# Altium schematic symbol library WR-TBL_Pluggable Connector.SchLib: 879 symbols (part 11 of 15)
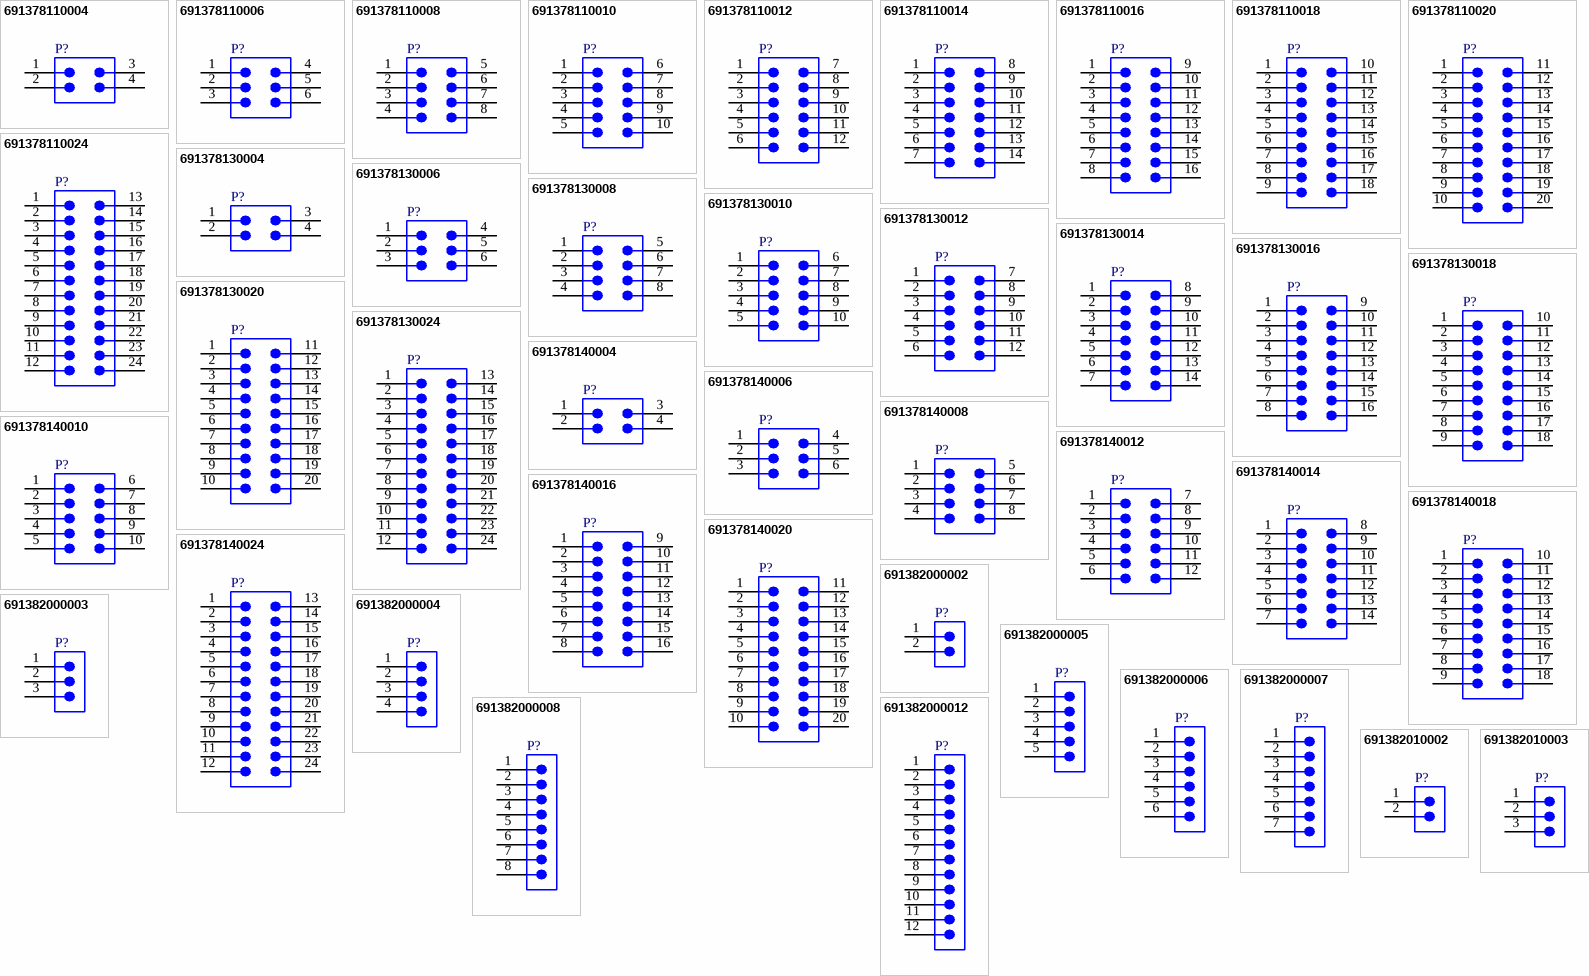
[diagram p31: symbols 691378110004 to 691382010003]

## 691382000006
designator P?  (value not drawn)
WR-TBL Series 382 Vertical PCB Header, THT, pitch 2.5mm, 06p; Manufacturer: Wurth Elektronik; Modularity: No; Rated Current: 12A; Working Voltage: 300V (AC); Manufacturer Part Number: 691382000006; Product Series: WR-TBL; ComponentLink1Description: Website Link; ComponentLink1URL: https://www.we-online.com; ComponentLink2Description: Datasheet Link; ComponentLink2URL: https://www.we-online.com/components/products/datasheet/691382000006; Mount: Through Hole; Operating Temperature Min: -40degC; Operating Temperature Max: 105degC; Packaging: Box; Application: Pluggable; Number of Pins: 6; Number of Rows: 1; Orientation: Vertical; Lead Pitch: 2.5mm
footprint 691382000006
pins: 1, 2, 3, 4, 5, 6

## 691382000007
designator P?  (value not drawn)
WR-TBL Series 382 Vertical PCB Header, THT, pitch 2.5mm, 07p; Manufacturer: Wurth Elektronik; Modularity: No; Rated Current: 12A; Working Voltage: 300V (AC); Manufacturer Part Number: 691382000007; Product Series: WR-TBL; ComponentLink1Description: Website Link; ComponentLink1URL: https://www.we-online.com; ComponentLink2Description: Datasheet Link; ComponentLink2URL: https://www.we-online.com/components/products/datasheet/691382000007; Mount: Through Hole; Operating Temperature Min: -40degC; Operating Temperature Max: 105degC; Packaging: Box; Application: Pluggable; Number of Pins: 7; Number of Rows: 1; Orientation: Vertical; Lead Pitch: 2.5mm
footprint 691382000007
pins: 1, 2, 3, 4, 5, 6, 7

## 691382000008
designator P?  (value not drawn)
WR-TBL Series 382 Vertical PCB Header, THT, pitch 2.5mm, 08p; Manufacturer: Wurth Elektronik; Modularity: No; Rated Current: 12A; Working Voltage: 300V (AC); Manufacturer Part Number: 691382000008; Product Series: WR-TBL; ComponentLink1Description: Website Link; ComponentLink1URL: https://www.we-online.com; ComponentLink2Description: Datasheet Link; ComponentLink2URL: https://www.we-online.com/components/products/datasheet/691382000008; Mount: Through Hole; Operating Temperature Min: -40degC; Operating Temperature Max: 105degC; Packaging: Box; Application: Pluggable; Number of Pins: 8; Number of Rows: 1; Orientation: Vertical; Lead Pitch: 2.5mm
footprint 691382000008
pins: 1, 2, 3, 4, 5, 6, 7, 8

## 691382000012
designator P?  (value not drawn)
WR-TBL Series 382 Vertical PCB Header, THT, pitch 2.5mm, 12p; Manufacturer: Wurth Elektronik; Modularity: No; Rated Current: 12A; Working Voltage: 300V (AC); Manufacturer Part Number: 691382000012; Product Series: WR-TBL; ComponentLink1Description: Website Link; ComponentLink1URL: https://www.we-online.com; ComponentLink2Description: Datasheet Link; ComponentLink2URL: https://www.we-online.com/components/products/datasheet/691382000012; Mount: Through Hole; Operating Temperature Min: -40degC; Operating Temperature Max: 105degC; Packaging: Box; Application: Pluggable; Number of Pins: 12; Number of Rows: 1; Orientation: Vertical; Lead Pitch: 2.5mm
footprint 691382000012
pins: 1, 2, 3, 4, 5, 6, 7, 8, 9, 10, 11, 12

## 691382010002
designator P?  (value not drawn)
WR-TBL Series 382 Horizontal PCB Header, THT, pitch 2.5mm, 02p; Manufacturer: Wurth Elektronik; Modularity: No; Rated Current: 12A; Working Voltage: 300V (AC); Manufacturer Part Number: 691382010002; Product Series: WR-TBL; ComponentLink1Description: Website Link; ComponentLink1URL: https://www.we-online.com; ComponentLink2Description: Datasheet Link; ComponentLink2URL: https://www.we-online.com/components/products/datasheet/691382010002; Mount: Through Hole; Operating Temperature Min: -40degC; Operating Temperature Max: 105degC; Packaging: Box; Application: Pluggable; Number of Pins: 2; Number of Rows: 1; Orientation: Horizontal; Lead Pitch: 2.5mm
footprint 691382010002
pins: 1, 2

## 691382010003
designator P?  (value not drawn)
WR-TBL Series 382 Horizontal PCB Header, THT, pitch 2.5mm, 03p; Manufacturer: Wurth Elektronik; Modularity: No; Rated Current: 12A; Working Voltage: 300V (AC); Manufacturer Part Number: 691382010003; Product Series: WR-TBL; ComponentLink1Description: Website Link; ComponentLink1URL: https://www.we-online.com; ComponentLink2Description: Datasheet Link; ComponentLink2URL: https://www.we-online.com/components/products/datasheet/691382010003; Mount: Through Hole; Operating Temperature Min: -40degC; Operating Temperature Max: 105degC; Packaging: Box; Application: Pluggable; Number of Pins: 3; Number of Rows: 1; Orientation: Horizontal; Lead Pitch: 2.5mm
footprint 691382010003
pins: 1, 2, 3

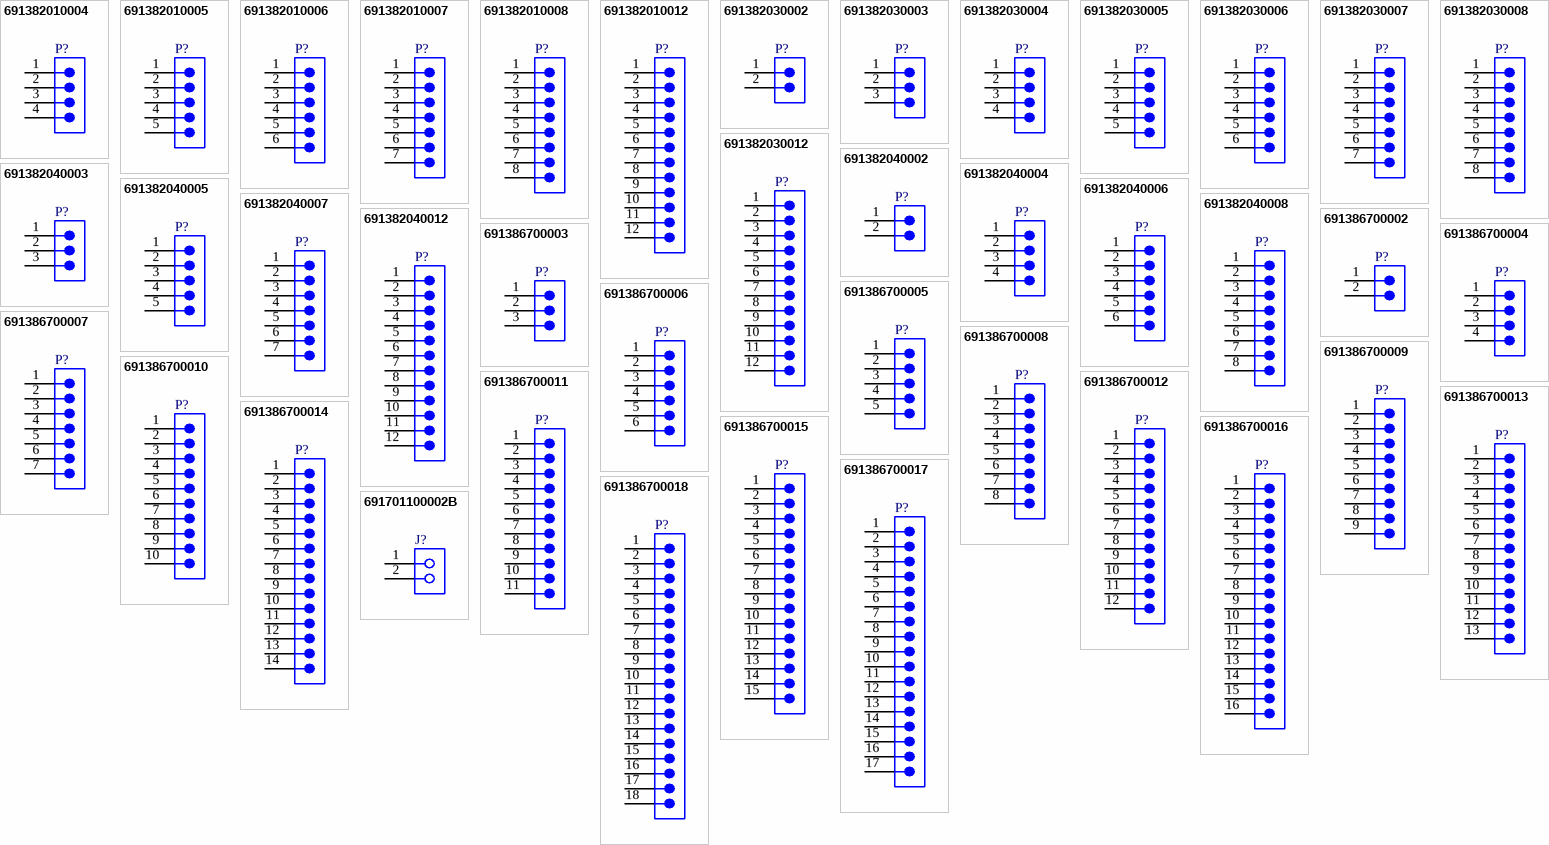
[diagram p16: symbols 691382010004 to 691701100002B]

## 691382010004
designator P?  (value not drawn)
WR-TBL Series 382 Horizontal PCB Header, THT, pitch 2.5mm, 04p; Manufacturer: Wurth Elektronik; Modularity: No; Rated Current: 12A; Working Voltage: 300V (AC); Manufacturer Part Number: 691382010004; Product Series: WR-TBL; ComponentLink1Description: Website Link; ComponentLink1URL: https://www.we-online.com; ComponentLink2Description: Datasheet Link; ComponentLink2URL: https://www.we-online.com/components/products/datasheet/691382010004; Mount: Through Hole; Operating Temperature Min: -40degC; Operating Temperature Max: 105degC; Packaging: Box; Application: Pluggable; Number of Pins: 4; Number of Rows: 1; Orientation: Horizontal; Lead Pitch: 2.5mm
footprint 691382010004
pins: 1, 2, 3, 4

## 691382010005
designator P?  (value not drawn)
WR-TBL Series 382 Horizontal PCB Header, THT, pitch 2.5mm, 05p; Manufacturer: Wurth Elektronik; Modularity: No; Rated Current: 12A; Working Voltage: 300V (AC); Manufacturer Part Number: 691382010005; Product Series: WR-TBL; ComponentLink1Description: Website Link; ComponentLink1URL: https://www.we-online.com; ComponentLink2Description: Datasheet Link; ComponentLink2URL: https://www.we-online.com/components/products/datasheet/691382010005; Mount: Through Hole; Operating Temperature Min: -40degC; Operating Temperature Max: 105degC; Packaging: Box; Application: Pluggable; Number of Pins: 5; Number of Rows: 1; Orientation: Horizontal; Lead Pitch: 2.5mm
footprint 691382010005
pins: 1, 2, 3, 4, 5

## 691382010006
designator P?  (value not drawn)
WR-TBL Series 382 Horizontal PCB Header, THT, pitch 2.5mm, 06p; Manufacturer: Wurth Elektronik; Modularity: No; Rated Current: 12A; Working Voltage: 300V (AC); Manufacturer Part Number: 691382010006; Product Series: WR-TBL; ComponentLink1Description: Website Link; ComponentLink1URL: https://www.we-online.com; ComponentLink2Description: Datasheet Link; ComponentLink2URL: https://www.we-online.com/components/products/datasheet/691382010006; Mount: Through Hole; Operating Temperature Min: -40degC; Operating Temperature Max: 105degC; Packaging: Box; Application: Pluggable; Number of Pins: 6; Number of Rows: 1; Orientation: Horizontal; Lead Pitch: 2.5mm
footprint 691382010006
pins: 1, 2, 3, 4, 5, 6

## 691382010007
designator P?  (value not drawn)
WR-TBL Series 382 Horizontal PCB Header, THT, pitch 2.5mm, 07p; Manufacturer: Wurth Elektronik; Modularity: No; Rated Current: 12A; Working Voltage: 300V (AC); Manufacturer Part Number: 691382010007; Product Series: WR-TBL; ComponentLink1Description: Website Link; ComponentLink1URL: https://www.we-online.com; ComponentLink2Description: Datasheet Link; ComponentLink2URL: https://www.we-online.com/components/products/datasheet/691382010007; Mount: Through Hole; Operating Temperature Min: -40degC; Operating Temperature Max: 105degC; Packaging: Box; Application: Pluggable; Number of Pins: 7; Number of Rows: 1; Orientation: Horizontal; Lead Pitch: 2.5mm
footprint 691382010007
pins: 1, 2, 3, 4, 5, 6, 7

## 691382010008
designator P?  (value not drawn)
WR-TBL Series 382 Horizontal PCB Header, THT, pitch 2.5mm, 08p; Manufacturer: Wurth Elektronik; Modularity: No; Rated Current: 12A; Working Voltage: 300V (AC); Manufacturer Part Number: 691382010008; Product Series: WR-TBL; ComponentLink1Description: Website Link; ComponentLink1URL: https://www.we-online.com; ComponentLink2Description: Datasheet Link; ComponentLink2URL: https://www.we-online.com/components/products/datasheet/691382010008; Mount: Through Hole; Operating Temperature Min: -40degC; Operating Temperature Max: 105degC; Packaging: Box; Application: Pluggable; Number of Pins: 8; Number of Rows: 1; Orientation: Horizontal; Lead Pitch: 2.5mm
footprint 691382010008
pins: 1, 2, 3, 4, 5, 6, 7, 8

## 691382010012
designator P?  (value not drawn)
WR-TBL Series 382 Horizontal PCB Header, THT, pitch 2.5mm, 12p; Manufacturer: Wurth Elektronik; Modularity: No; Rated Current: 12A; Working Voltage: 300V (AC); Manufacturer Part Number: 691382010012; Product Series: WR-TBL; ComponentLink1Description: Website Link; ComponentLink1URL: https://www.we-online.com; ComponentLink2Description: Datasheet Link; ComponentLink2URL: https://www.we-online.com/components/products/datasheet/691382010012; Mount: Through Hole; Operating Temperature Min: -40degC; Operating Temperature Max: 105degC; Packaging: Box; Application: Pluggable; Number of Pins: 12; Number of Rows: 1; Orientation: Horizontal; Lead Pitch: 2.5mm
footprint 691382010012
pins: 1, 2, 3, 4, 5, 6, 7, 8, 9, 10, 11, 12

## 691382030002
designator P?  (value not drawn)
WR-TBL Series 382 Vertical PCB Header with Flanges, THT, pitch 2.5mm, 02p; Manufacturer: Wurth Elektronik; Modularity: No; Rated Current: 12A; Working Voltage: 300V (AC); Manufacturer Part Number: 691382030002; Product Series: WR-TBL; ComponentLink1Description: Website Link; ComponentLink1URL: https://www.we-online.com; ComponentLink2Description: Datasheet Link; ComponentLink2URL: https://www.we-online.com/components/products/datasheet/691382030002; Mount: Through Hole; Operating Temperature Min: -40degC; Operating Temperature Max: 105degC; Packaging: Box; Application: Pluggable; Number of Pins: 2; Number of Rows: 1; Orientation: Vertical; Lead Pitch: 2.5mm
footprint 691382030002
pins: 1, 2

## 691382030003
designator P?  (value not drawn)
WR-TBL Series 382 Vertical PCB Header with Flanges, THT, pitch 2.5mm, 03p; Manufacturer: Wurth Elektronik; Modularity: No; Rated Current: 12A; Working Voltage: 300V (AC); Manufacturer Part Number: 691382030003; Product Series: WR-TBL; ComponentLink1Description: Website Link; ComponentLink1URL: https://www.we-online.com; ComponentLink2Description: Datasheet Link; ComponentLink2URL: https://www.we-online.com/components/products/datasheet/691382030003; Mount: Through Hole; Operating Temperature Min: -40degC; Operating Temperature Max: 105degC; Packaging: Box; Application: Pluggable; Number of Pins: 3; Number of Rows: 1; Orientation: Vertical; Lead Pitch: 2.5mm
footprint 691382030003
pins: 1, 2, 3

## 691382030004
designator P?  (value not drawn)
WR-TBL Series 382 Vertical PCB Header with Flanges, THT, pitch 2.5mm, 04p; Manufacturer: Wurth Elektronik; Modularity: No; Rated Current: 12A; Working Voltage: 300V (AC); Manufacturer Part Number: 691382030004; Product Series: WR-TBL; ComponentLink1Description: Website Link; ComponentLink1URL: https://www.we-online.com; ComponentLink2Description: Datasheet Link; ComponentLink2URL: https://www.we-online.com/components/products/datasheet/691382030004; Mount: Through Hole; Operating Temperature Min: -40degC; Operating Temperature Max: 105degC; Packaging: Box; Application: Pluggable; Number of Pins: 4; Number of Rows: 1; Orientation: Vertical; Lead Pitch: 2.5mm
footprint 691382030004
pins: 1, 2, 3, 4

## 691382030005
designator P?  (value not drawn)
WR-TBL Series 382 Vertical PCB Header with Flanges, THT, pitch 2.5mm, 05p; Manufacturer: Wurth Elektronik; Modularity: No; Rated Current: 12A; Working Voltage: 300V (AC); Manufacturer Part Number: 691382030005; Product Series: WR-TBL; ComponentLink1Description: Website Link; ComponentLink1URL: https://www.we-online.com; ComponentLink2Description: Datasheet Link; ComponentLink2URL: https://www.we-online.com/components/products/datasheet/691382030005; Mount: Through Hole; Operating Temperature Min: -40degC; Operating Temperature Max: 105degC; Packaging: Box; Application: Pluggable; Number of Pins: 5; Number of Rows: 1; Orientation: Vertical; Lead Pitch: 2.5mm
footprint 691382030005
pins: 1, 2, 3, 4, 5

## 691382030006
designator P?  (value not drawn)
WR-TBL Series 382 Vertical PCB Header with Flanges, THT, pitch 2.5mm, 06p; Manufacturer: Wurth Elektronik; Modularity: No; Rated Current: 12A; Working Voltage: 300V (AC); Manufacturer Part Number: 691382030006; Product Series: WR-TBL; ComponentLink1Description: Website Link; ComponentLink1URL: https://www.we-online.com; ComponentLink2Description: Datasheet Link; ComponentLink2URL: https://www.we-online.com/components/products/datasheet/691382030006; Mount: Through Hole; Operating Temperature Min: -40degC; Operating Temperature Max: 105degC; Packaging: Box; Application: Pluggable; Number of Pins: 6; Number of Rows: 1; Orientation: Vertical; Lead Pitch: 2.5mm
footprint 691382030006
pins: 1, 2, 3, 4, 5, 6

## 691382030007
designator P?  (value not drawn)
WR-TBL Series 382 Vertical PCB Header with Flanges, THT, pitch 2.5mm, 07p; Manufacturer: Wurth Elektronik; Modularity: No; Rated Current: 12A; Working Voltage: 300V (AC); Manufacturer Part Number: 691382030007; Product Series: WR-TBL; ComponentLink1Description: Website Link; ComponentLink1URL: https://www.we-online.com; ComponentLink2Description: Datasheet Link; ComponentLink2URL: https://www.we-online.com/components/products/datasheet/691382030007; Mount: Through Hole; Operating Temperature Min: -40degC; Operating Temperature Max: 105degC; Packaging: Box; Application: Pluggable; Number of Pins: 7; Number of Rows: 1; Orientation: Vertical; Lead Pitch: 2.5mm
footprint 691382030007
pins: 1, 2, 3, 4, 5, 6, 7

## 691382030008
designator P?  (value not drawn)
WR-TBL Series 382 Vertical PCB Header with Flanges, THT, pitch 2.5mm, 08p; Manufacturer: Wurth Elektronik; Modularity: No; Rated Current: 12A; Working Voltage: 300V (AC); Manufacturer Part Number: 691382030008; Product Series: WR-TBL; ComponentLink1Description: Website Link; ComponentLink1URL: https://www.we-online.com; ComponentLink2Description: Datasheet Link; ComponentLink2URL: https://www.we-online.com/components/products/datasheet/691382030008; Mount: Through Hole; Operating Temperature Min: -40degC; Operating Temperature Max: 105degC; Packaging: Box; Application: Pluggable; Number of Pins: 8; Number of Rows: 1; Orientation: Vertical; Lead Pitch: 2.5mm
footprint 691382030008
pins: 1, 2, 3, 4, 5, 6, 7, 8

## 691382030012
designator P?  (value not drawn)
WR-TBL Series 382 Vertical PCB Header with Flanges, THT, pitch 2.5mm, 12p; Manufacturer: Wurth Elektronik; Modularity: No; Rated Current: 12A; Working Voltage: 300V (AC); Manufacturer Part Number: 691382030012; Product Series: WR-TBL; ComponentLink1Description: Website Link; ComponentLink1URL: https://www.we-online.com; ComponentLink2Description: Datasheet Link; ComponentLink2URL: https://www.we-online.com/components/products/datasheet/691382030012; Mount: Through Hole; Operating Temperature Min: -40degC; Operating Temperature Max: 105degC; Packaging: Box; Application: Pluggable; Number of Pins: 12; Number of Rows: 1; Orientation: Vertical; Lead Pitch: 2.5mm
footprint 691382030012
pins: 1, 2, 3, 4, 5, 6, 7, 8, 9, 10, 11, 12

## 691382040002
designator P?  (value not drawn)
WR-TBL Series 382 Horizontal PCB Header with Flanges, THT, pitch 2.5mm, 02p; Manufacturer: Wurth Elektronik; Modularity: No; Rated Current: 12A; Working Voltage: 300V (AC); Manufacturer Part Number: 691382040002; Product Series: WR-TBL; ComponentLink1Description: Website Link; ComponentLink1URL: https://www.we-online.com; ComponentLink2Description: Datasheet Link; ComponentLink2URL: https://www.we-online.com/components/products/datasheet/691382040002; Mount: Through Hole; Operating Temperature Min: -40degC; Operating Temperature Max: 105degC; Packaging: Box; Application: Pluggable; Number of Pins: 2; Number of Rows: 1; Orientation: Horizontal; Lead Pitch: 2.5mm
footprint 691382040002
pins: 1, 2

## 691382040003
designator P?  (value not drawn)
WR-TBL Series 382 Horizontal PCB Header with Flanges, THT, pitch 2.5mm, 03p; Manufacturer: Wurth Elektronik; Modularity: No; Rated Current: 12A; Working Voltage: 300V (AC); Manufacturer Part Number: 691382040003; Product Series: WR-TBL; ComponentLink1Description: Website Link; ComponentLink1URL: https://www.we-online.com; ComponentLink2Description: Datasheet Link; ComponentLink2URL: https://www.we-online.com/components/products/datasheet/691382040003; Mount: Through Hole; Operating Temperature Min: -40degC; Operating Temperature Max: 105degC; Packaging: Box; Application: Pluggable; Number of Pins: 3; Number of Rows: 1; Orientation: Horizontal; Lead Pitch: 2.5mm
footprint 691382040003
pins: 1, 2, 3

## 691382040004
designator P?  (value not drawn)
WR-TBL Series 382 Horizontal PCB Header with Flanges, THT, pitch 2.5mm, 04p; Manufacturer: Wurth Elektronik; Modularity: No; Rated Current: 12A; Working Voltage: 300V (AC); Manufacturer Part Number: 691382040004; Product Series: WR-TBL; ComponentLink1Description: Website Link; ComponentLink1URL: https://www.we-online.com; ComponentLink2Description: Datasheet Link; ComponentLink2URL: https://www.we-online.com/components/products/datasheet/691382040004; Mount: Through Hole; Operating Temperature Min: -40degC; Operating Temperature Max: 105degC; Packaging: Box; Application: Pluggable; Number of Pins: 4; Number of Rows: 1; Orientation: Horizontal; Lead Pitch: 2.5mm
footprint 691382040004
pins: 1, 2, 3, 4

## 691382040005
designator P?  (value not drawn)
WR-TBL Series 382 Horizontal PCB Header with Flanges, THT, pitch 2.5mm, 05p; Manufacturer: Wurth Elektronik; Modularity: No; Rated Current: 12A; Working Voltage: 300V (AC); Manufacturer Part Number: 691382040005; Product Series: WR-TBL; ComponentLink1Description: Website Link; ComponentLink1URL: https://www.we-online.com; ComponentLink2Description: Datasheet Link; ComponentLink2URL: https://www.we-online.com/components/products/datasheet/691382040005; Mount: Through Hole; Operating Temperature Min: -40degC; Operating Temperature Max: 105degC; Packaging: Box; Application: Pluggable; Number of Pins: 5; Number of Rows: 1; Orientation: Horizontal; Lead Pitch: 2.5mm
footprint 691382040005
pins: 1, 2, 3, 4, 5

## 691382040006
designator P?  (value not drawn)
WR-TBL Series 382 Horizontal PCB Header with Flanges, THT, pitch 2.5mm, 06p; Manufacturer: Wurth Elektronik; Modularity: No; Rated Current: 12A; Working Voltage: 300V (AC); Manufacturer Part Number: 691382040006; Product Series: WR-TBL; ComponentLink1Description: Website Link; ComponentLink1URL: https://www.we-online.com; ComponentLink2Description: Datasheet Link; ComponentLink2URL: https://www.we-online.com/components/products/datasheet/691382040006; Mount: Through Hole; Operating Temperature Min: -40degC; Operating Temperature Max: 105degC; Packaging: Box; Application: Pluggable; Number of Pins: 6; Number of Rows: 1; Orientation: Horizontal; Lead Pitch: 2.5mm
footprint 691382040006
pins: 1, 2, 3, 4, 5, 6

## 691382040007
designator P?  (value not drawn)
WR-TBL Series 382 Horizontal PCB Header with Flanges, THT, pitch 2.5mm, 07p; Manufacturer: Wurth Elektronik; Modularity: No; Rated Current: 12A; Working Voltage: 300V (AC); Manufacturer Part Number: 691382040007; Product Series: WR-TBL; ComponentLink1Description: Website Link; ComponentLink1URL: https://www.we-online.com; ComponentLink2Description: Datasheet Link; ComponentLink2URL: https://www.we-online.com/components/products/datasheet/691382040007; Mount: Through Hole; Operating Temperature Min: -40degC; Operating Temperature Max: 105degC; Packaging: Box; Application: Pluggable; Number of Pins: 7; Number of Rows: 1; Orientation: Horizontal; Lead Pitch: 2.5mm
footprint 691382040007
pins: 1, 2, 3, 4, 5, 6, 7

## 691382040008
designator P?  (value not drawn)
WR-TBL Series 382 Horizontal PCB Header with Flanges, THT, pitch 2.5mm, 08p; Manufacturer: Wurth Elektronik; Modularity: No; Rated Current: 12A; Working Voltage: 300V (AC); Manufacturer Part Number: 691382040008; Product Series: WR-TBL; ComponentLink1Description: Website Link; ComponentLink1URL: https://www.we-online.com; ComponentLink2Description: Datasheet Link; ComponentLink2URL: https://www.we-online.com/components/products/datasheet/691382040008; Mount: Through Hole; Operating Temperature Min: -40degC; Operating Temperature Max: 105degC; Packaging: Box; Application: Pluggable; Number of Pins: 8; Number of Rows: 1; Orientation: Horizontal; Lead Pitch: 2.5mm
footprint 691382040008
pins: 1, 2, 3, 4, 5, 6, 7, 8

## 691382040012
designator P?  (value not drawn)
WR-TBL Series 382 Horizontal PCB Header with Flanges, THT, pitch 2.5mm, 12p; Manufacturer: Wurth Elektronik; Modularity: No; Rated Current: 12A; Working Voltage: 300V (AC); Manufacturer Part Number: 691382040012; Product Series: WR-TBL; ComponentLink1Description: Website Link; ComponentLink1URL: https://www.we-online.com; ComponentLink2Description: Datasheet Link; ComponentLink2URL: https://www.we-online.com/components/products/datasheet/691382040012; Mount: Through Hole; Operating Temperature Min: -40degC; Operating Temperature Max: 105degC; Packaging: Box; Application: Pluggable; Number of Pins: 12; Number of Rows: 1; Orientation: Horizontal; Lead Pitch: 2.5mm
footprint 691382040012
pins: 1, 2, 3, 4, 5, 6, 7, 8, 9, 10, 11, 12

## 691386700002
designator P?  (value not drawn)
WR-TBL Series 386 Horizontal/Vertical Divisible PCB Header, THT, pitch 5mm, 02p; Manufacturer: Wurth Elektronik; Modularity: No; Rated Current: 14A; Working Voltage: 300V (AC); Manufacturer Part Number: 691386700002; Product Series: WR-TBL; ComponentLink1Description: Website Link; ComponentLink1URL: https://www.we-online.com; ComponentLink2Description: Datasheet Link; ComponentLink2URL: https://www.we-online.com/components/products/datasheet/691386700002; Mount: Through Hole; Operating Temperature Min: -30degC; Operating Temperature Max: 120degC; Packaging: Box; Application: Pluggable; Number of Pins: 2; Number of Rows: 1; Orientation: Horizontal/Vertical; Lead Pitch: 5mm
footprint 691386700002
pins: 1, 2

## 691386700003
designator P?  (value not drawn)
WR-TBL Series 386 Horizontal/Vertical Divisible PCB Header, THT, pitch 5mm, 03p; Manufacturer: Wurth Elektronik; Modularity: No; Rated Current: 14A; Working Voltage: 300V (AC); Manufacturer Part Number: 691386700003; Product Series: WR-TBL; ComponentLink1Description: Website Link; ComponentLink1URL: https://www.we-online.com; ComponentLink2Description: Datasheet Link; ComponentLink2URL: https://www.we-online.com/components/products/datasheet/691386700003; Mount: Through Hole; Operating Temperature Min: -30degC; Operating Temperature Max: 120degC; Packaging: Box; Application: Pluggable; Number of Pins: 3; Number of Rows: 1; Orientation: Horizontal/Vertical; Lead Pitch: 5mm
footprint 691386700003
pins: 1, 2, 3

## 691386700004
designator P?  (value not drawn)
WR-TBL Series 386 Horizontal/Vertical Divisible PCB Header, THT, pitch 5mm, 04p; Manufacturer: Wurth Elektronik; Modularity: No; Rated Current: 14A; Working Voltage: 300V (AC); Manufacturer Part Number: 691386700004; Product Series: WR-TBL; ComponentLink1Description: Website Link; ComponentLink1URL: https://www.we-online.com; ComponentLink2Description: Datasheet Link; ComponentLink2URL: https://www.we-online.com/components/products/datasheet/691386700004; Mount: Through Hole; Operating Temperature Min: -30degC; Operating Temperature Max: 120degC; Packaging: Box; Application: Pluggable; Number of Pins: 4; Number of Rows: 1; Orientation: Horizontal/Vertical; Lead Pitch: 5mm
footprint 691386700004
pins: 1, 2, 3, 4

## 691386700005
designator P?  (value not drawn)
WR-TBL Series 386 Horizontal/Vertical Divisible PCB Header, THT, pitch 5mm, 05p; Manufacturer: Wurth Elektronik; Modularity: No; Rated Current: 14A; Working Voltage: 300V (AC); Manufacturer Part Number: 691386700005; Product Series: WR-TBL; ComponentLink1Description: Website Link; ComponentLink1URL: https://www.we-online.com; ComponentLink2Description: Datasheet Link; ComponentLink2URL: https://www.we-online.com/components/products/datasheet/691386700005; Mount: Through Hole; Operating Temperature Min: -30degC; Operating Temperature Max: 120degC; Packaging: Box; Application: Pluggable; Number of Pins: 5; Number of Rows: 1; Orientation: Horizontal/Vertical; Lead Pitch: 5mm
footprint 691386700005
pins: 1, 2, 3, 4, 5

## 691386700006
designator P?  (value not drawn)
WR-TBL Series 386 Horizontal/Vertical Divisible PCB Header, THT, pitch 5mm, 06p; Manufacturer: Wurth Elektronik; Modularity: No; Rated Current: 14A; Working Voltage: 300V (AC); Manufacturer Part Number: 691386700006; Product Series: WR-TBL; ComponentLink1Description: Website Link; ComponentLink1URL: https://www.we-online.com; ComponentLink2Description: Datasheet Link; ComponentLink2URL: https://www.we-online.com/components/products/datasheet/691386700006; Mount: Through Hole; Operating Temperature Min: -30degC; Operating Temperature Max: 120degC; Packaging: Box; Application: Pluggable; Number of Pins: 6; Number of Rows: 1; Orientation: Horizontal/Vertical; Lead Pitch: 5mm
footprint 691386700006
pins: 1, 2, 3, 4, 5, 6

## 691386700007
designator P?  (value not drawn)
WR-TBL Series 386 Horizontal/Vertical Divisible PCB Header, THT, pitch 5mm, 07p; Manufacturer: Wurth Elektronik; Modularity: No; Rated Current: 14A; Working Voltage: 300V (AC); Manufacturer Part Number: 691386700007; Product Series: WR-TBL; ComponentLink1Description: Website Link; ComponentLink1URL: https://www.we-online.com; ComponentLink2Description: Datasheet Link; ComponentLink2URL: https://www.we-online.com/components/products/datasheet/691386700007; Mount: Through Hole; Operating Temperature Min: -30degC; Operating Temperature Max: 120degC; Packaging: Box; Application: Pluggable; Number of Pins: 7; Number of Rows: 1; Orientation: Horizontal/Vertical; Lead Pitch: 5mm
footprint 691386700007
pins: 1, 2, 3, 4, 5, 6, 7

## 691386700008
designator P?  (value not drawn)
WR-TBL Series 386 Horizontal/Vertical Divisible PCB Header, THT, pitch 5mm, 08p; Manufacturer: Wurth Elektronik; Modularity: No; Rated Current: 14A; Working Voltage: 300V (AC); Manufacturer Part Number: 691386700008; Product Series: WR-TBL; ComponentLink1Description: Website Link; ComponentLink1URL: https://www.we-online.com; ComponentLink2Description: Datasheet Link; ComponentLink2URL: https://www.we-online.com/components/products/datasheet/691386700008; Mount: Through Hole; Operating Temperature Min: -30degC; Operating Temperature Max: 120degC; Packaging: Box; Application: Pluggable; Number of Pins: 8; Number of Rows: 1; Orientation: Horizontal/Vertical; Lead Pitch: 5mm
footprint 691386700008
pins: 1, 2, 3, 4, 5, 6, 7, 8

## 691386700009
designator P?  (value not drawn)
WR-TBL Series 386 Horizontal/Vertical Divisible PCB Header, THT, pitch 5mm, 09p; Manufacturer: Wurth Elektronik; Modularity: No; Rated Current: 14A; Working Voltage: 300V (AC); Manufacturer Part Number: 691386700009; Product Series: WR-TBL; ComponentLink1Description: Website Link; ComponentLink1URL: https://www.we-online.com; ComponentLink2Description: Datasheet Link; ComponentLink2URL: https://www.we-online.com/components/products/datasheet/691386700009; Mount: Through Hole; Operating Temperature Min: -30degC; Operating Temperature Max: 120degC; Packaging: Box; Application: Pluggable; Number of Pins: 9; Number of Rows: 1; Orientation: Horizontal/Vertical; Lead Pitch: 5mm
footprint 691386700009
pins: 1, 2, 3, 4, 5, 6, 7, 8, 9

## 691386700010
designator P?  (value not drawn)
WR-TBL Series 386 Horizontal/Vertical Divisible PCB Header, THT, pitch 5mm, 10p; Manufacturer: Wurth Elektronik; Modularity: No; Rated Current: 14A; Working Voltage: 300V (AC); Manufacturer Part Number: 691386700010; Product Series: WR-TBL; ComponentLink1Description: Website Link; ComponentLink1URL: https://www.we-online.com; ComponentLink2Description: Datasheet Link; ComponentLink2URL: https://www.we-online.com/components/products/datasheet/691386700010; Mount: Through Hole; Operating Temperature Min: -30degC; Operating Temperature Max: 120degC; Packaging: Box; Application: Pluggable; Number of Pins: 10; Number of Rows: 1; Orientation: Horizontal/Vertical; Lead Pitch: 5mm
footprint 691386700010
pins: 1, 2, 3, 4, 5, 6, 7, 8, 9, 10

## 691386700011
designator P?  (value not drawn)
WR-TBL Series 386 Horizontal/Vertical Divisible PCB Header, THT, pitch 5mm, 11p; Manufacturer: Wurth Elektronik; Modularity: No; Rated Current: 14A; Working Voltage: 300V (AC); Manufacturer Part Number: 691386700011; Product Series: WR-TBL; ComponentLink1Description: Website Link; ComponentLink1URL: https://www.we-online.com; ComponentLink2Description: Datasheet Link; ComponentLink2URL: https://www.we-online.com/components/products/datasheet/691386700011; Mount: Through Hole; Operating Temperature Min: -30degC; Operating Temperature Max: 120degC; Packaging: Box; Application: Pluggable; Number of Pins: 11; Number of Rows: 1; Orientation: Horizontal/Vertical; Lead Pitch: 5mm
footprint 691386700011
pins: 1, 2, 3, 4, 5, 6, 7, 8, 9, 10, 11

## 691386700012
designator P?  (value not drawn)
WR-TBL Series 386 Horizontal/Vertical Divisible PCB Header, THT, pitch 5mm, 12p; Manufacturer: Wurth Elektronik; Modularity: No; Rated Current: 14A; Working Voltage: 300V (AC); Manufacturer Part Number: 691386700012; Product Series: WR-TBL; ComponentLink1Description: Website Link; ComponentLink1URL: https://www.we-online.com; ComponentLink2Description: Datasheet Link; ComponentLink2URL: https://www.we-online.com/components/products/datasheet/691386700012; Mount: Through Hole; Operating Temperature Min: -30degC; Operating Temperature Max: 120degC; Packaging: Box; Application: Pluggable; Number of Pins: 12; Number of Rows: 1; Orientation: Horizontal/Vertical; Lead Pitch: 5mm
footprint 691386700012
pins: 1, 2, 3, 4, 5, 6, 7, 8, 9, 10, 11, 12

## 691386700013
designator P?  (value not drawn)
WR-TBL Series 386 Horizontal/Vertical Divisible PCB Header, THT, pitch 5mm, 13p; Manufacturer: Wurth Elektronik; Modularity: No; Rated Current: 14A; Working Voltage: 300V (AC); Manufacturer Part Number: 691386700013; Product Series: WR-TBL; ComponentLink1Description: Website Link; ComponentLink1URL: https://www.we-online.com; ComponentLink2Description: Datasheet Link; ComponentLink2URL: https://www.we-online.com/components/products/datasheet/691386700013; Mount: Through Hole; Operating Temperature Min: -30degC; Operating Temperature Max: 120degC; Packaging: Box; Application: Pluggable; Number of Pins: 13; Number of Rows: 1; Orientation: Horizontal/Vertical; Lead Pitch: 5mm
footprint 691386700013
pins: 1, 2, 3, 4, 5, 6, 7, 8, 9, 10, 11, 12, 13

## 691386700014
designator P?  (value not drawn)
WR-TBL Series 386 Horizontal/Vertical Divisible PCB Header, THT, pitch 5mm, 14p; Manufacturer: Wurth Elektronik; Modularity: No; Rated Current: 14A; Working Voltage: 300V (AC); Manufacturer Part Number: 691386700014; Product Series: WR-TBL; ComponentLink1Description: Website Link; ComponentLink1URL: https://www.we-online.com; ComponentLink2Description: Datasheet Link; ComponentLink2URL: https://www.we-online.com/components/products/datasheet/691386700014; Mount: Through Hole; Operating Temperature Min: -30degC; Operating Temperature Max: 120degC; Packaging: Box; Application: Pluggable; Number of Pins: 14; Number of Rows: 1; Orientation: Horizontal/Vertical; Lead Pitch: 5mm
footprint 691386700014
pins: 1, 2, 3, 4, 5, 6, 7, 8, 9, 10, 11, 12, 13, 14

## 691386700015
designator P?  (value not drawn)
WR-TBL Series 386 Horizontal/Vertical Divisible PCB Header, THT, pitch 5mm, 15p; Manufacturer: Wurth Elektronik; Modularity: No; Rated Current: 14A; Working Voltage: 300V (AC); Manufacturer Part Number: 691386700015; Product Series: WR-TBL; ComponentLink1Description: Website Link; ComponentLink1URL: https://www.we-online.com; ComponentLink2Description: Datasheet Link; ComponentLink2URL: https://www.we-online.com/components/products/datasheet/691386700015; Mount: Through Hole; Operating Temperature Min: -30degC; Operating Temperature Max: 120degC; Packaging: Box; Application: Pluggable; Number of Pins: 15; Number of Rows: 1; Orientation: Horizontal/Vertical; Lead Pitch: 5mm
footprint 691386700015
pins: 1, 2, 3, 4, 5, 6, 7, 8, 9, 10, 11, 12, 13, 14, 15

## 691386700016
designator P?  (value not drawn)
WR-TBL Series 386 Horizontal/Vertical Divisible PCB Header, THT, pitch 5mm, 16p; Manufacturer: Wurth Elektronik; Modularity: No; Rated Current: 14A; Working Voltage: 300V (AC); Manufacturer Part Number: 691386700016; Product Series: WR-TBL; ComponentLink1Description: Website Link; ComponentLink1URL: https://www.we-online.com; ComponentLink2Description: Datasheet Link; ComponentLink2URL: https://www.we-online.com/components/products/datasheet/691386700016; Mount: Through Hole; Operating Temperature Min: -30degC; Operating Temperature Max: 120degC; Packaging: Box; Application: Pluggable; Number of Pins: 16; Number of Rows: 1; Orientation: Horizontal/Vertical; Lead Pitch: 5mm
footprint 691386700016
pins: 1, 2, 3, 4, 5, 6, 7, 8, 9, 10, 11, 12, 13, 14, 15, 16

## 691386700017
designator P?  (value not drawn)
WR-TBL Series 386 Horizontal/Vertical Divisible PCB Header, THT, pitch 5mm, 17p; Manufacturer: Wurth Elektronik; Modularity: No; Rated Current: 14A; Working Voltage: 300V (AC); Manufacturer Part Number: 691386700017; Product Series: WR-TBL; ComponentLink1Description: Website Link; ComponentLink1URL: https://www.we-online.com; ComponentLink2Description: Datasheet Link; ComponentLink2URL: https://www.we-online.com/components/products/datasheet/691386700017; Mount: Through Hole; Operating Temperature Min: -30degC; Operating Temperature Max: 120degC; Packaging: Box; Application: Pluggable; Number of Pins: 17; Number of Rows: 1; Orientation: Horizontal/Vertical; Lead Pitch: 5mm
footprint 691386700017
pins: 1, 2, 3, 4, 5, 6, 7, 8, 9, 10, 11, 12, 13, 14, 15, 16, 17

## 691386700018
designator P?  (value not drawn)
WR-TBL Series 386 Horizontal/Vertical Divisible PCB Header, THT, pitch 5mm, 18p; Manufacturer: Wurth Elektronik; Modularity: No; Rated Current: 14A; Working Voltage: 300V (AC); Manufacturer Part Number: 691386700018; Product Series: WR-TBL; ComponentLink1Description: Website Link; ComponentLink1URL: https://www.we-online.com; ComponentLink2Description: Datasheet Link; ComponentLink2URL: https://www.we-online.com/components/products/datasheet/691386700018; Mount: Through Hole; Operating Temperature Min: -30degC; Operating Temperature Max: 120degC; Packaging: Box; Application: Pluggable; Number of Pins: 18; Number of Rows: 1; Orientation: Horizontal/Vertical; Lead Pitch: 5mm
footprint 691386700018
pins: 1, 2, 3, 4, 5, 6, 7, 8, 9, 10, 11, 12, 13, 14, 15, 16, 17, 18

## 691701100002B
designator J?  (value not drawn)
WR-TBL Series 7011B Vertical PCB Header, THR, pitch 3.5mm, 02p; Manufacturer: Wurth Elektronik; Insulator Material: LCP; Rated Current (cULus): 10A; Rated Current (VDE): 8A; Working Voltage (cULus): 300V (AC); Working Voltage (VDE): 250V (AC); Withstanding Voltage (cULus): 1600V (AC); Withstanding Voltage (VDE): 1400V (AC); Manufacturer Part Number: 691701100002B; Product Series: WR-TBL; ComponentLink1Description: Website Link; ComponentLink1URL: https://www.we-online.com; ComponentLink2Description: Datasheet Link; ComponentLink2URL: https://www.we-online.com/components/products/datasheet/691701100002B; Mount: Through Hole Reflow; Operating Temperature Min: -40degC; Operating Temperature Max: 130degC; Packaging: Tape and Reel; Application: Pluggable; Number of Pins: 2; Number of Rows: 1; Orientation: Vertical; Lead Pitch: 3.5mm
footprint 691701100002B
pins: 1, 2

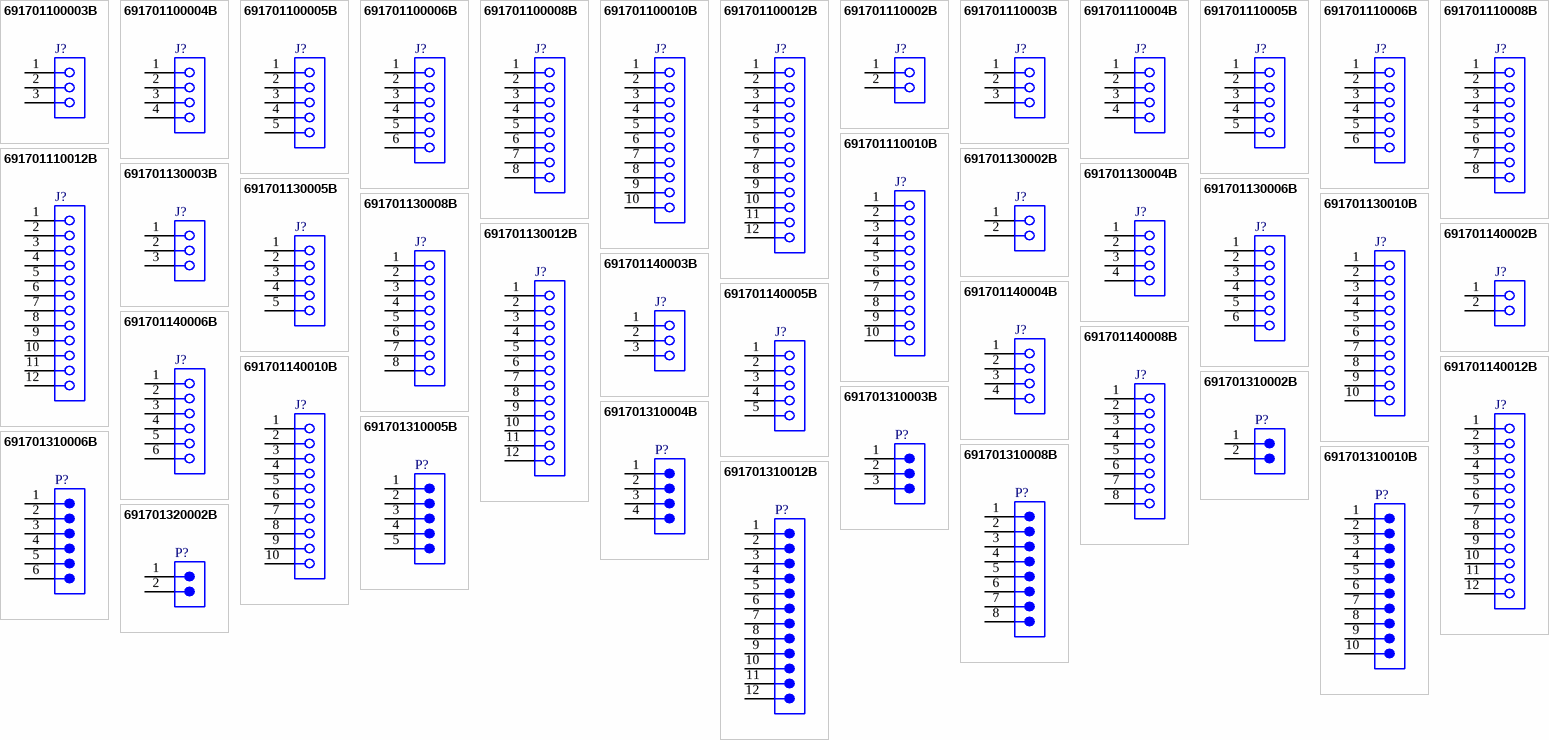
[diagram p17: symbols 691701100003B to 691701320002B]

## 691701100003B
designator J?  (value not drawn)
WR-TBL Series 7011B Vertical PCB Header, THR, pitch 3.5mm, 03p; Manufacturer: Wurth Elektronik; Insulator Material: LCP; Rated Current (cULus): 10A; Rated Current (VDE): 8A; Working Voltage (cULus): 300V (AC); Working Voltage (VDE): 250V (AC); Withstanding Voltage (cULus): 1600V (AC); Withstanding Voltage (VDE): 1400V (AC); Manufacturer Part Number: 691701100003B; Product Series: WR-TBL; ComponentLink1Description: Website Link; ComponentLink1URL: https://www.we-online.com; ComponentLink2Description: Datasheet Link; ComponentLink2URL: https://www.we-online.com/components/products/datasheet/691701100003B; Mount: Through Hole Reflow; Operating Temperature Min: -40degC; Operating Temperature Max: 130degC; Packaging: Tape and Reel; Application: Pluggable; Number of Pins: 3; Number of Rows: 1; Orientation: Vertical; Lead Pitch: 3.5mm
footprint 691701100003B
pins: 1, 2, 3

## 691701100004B
designator J?  (value not drawn)
WR-TBL Series 7011B Vertical PCB Header, THR, pitch 3.5mm, 04p; Manufacturer: Wurth Elektronik; Insulator Material: LCP; Rated Current (cULus): 10A; Rated Current (VDE): 8A; Working Voltage (cULus): 300V (AC); Working Voltage (VDE): 250V (AC); Withstanding Voltage (cULus): 1600V (AC); Withstanding Voltage (VDE): 1400V (AC); Manufacturer Part Number: 691701100004B; Product Series: WR-TBL; ComponentLink1Description: Website Link; ComponentLink1URL: https://www.we-online.com; ComponentLink2Description: Datasheet Link; ComponentLink2URL: https://www.we-online.com/components/products/datasheet/691701100004B; Mount: Through Hole Reflow; Operating Temperature Min: -40degC; Operating Temperature Max: 130degC; Packaging: Tape and Reel; Application: Pluggable; Number of Pins: 4; Number of Rows: 1; Orientation: Vertical; Lead Pitch: 3.5mm
footprint 691701100004B
pins: 1, 2, 3, 4

## 691701100005B
designator J?  (value not drawn)
WR-TBL Series 7011B Vertical PCB Header, THR, pitch 3.5mm, 05p; Manufacturer: Wurth Elektronik; Insulator Material: LCP; Rated Current (cULus): 10A; Rated Current (VDE): 8A; Working Voltage (cULus): 300V (AC); Working Voltage (VDE): 250V (AC); Withstanding Voltage (cULus): 1600V (AC); Withstanding Voltage (VDE): 1400V (AC); Manufacturer Part Number: 691701100005B; Product Series: WR-TBL; ComponentLink1Description: Website Link; ComponentLink1URL: https://www.we-online.com; ComponentLink2Description: Datasheet Link; ComponentLink2URL: https://www.we-online.com/components/products/datasheet/691701100005B; Mount: Through Hole Reflow; Operating Temperature Min: -40degC; Operating Temperature Max: 130degC; Packaging: Tape and Reel; Application: Pluggable; Number of Pins: 5; Number of Rows: 1; Orientation: Vertical; Lead Pitch: 3.5mm
footprint 691701100005B
pins: 1, 2, 3, 4, 5

## 691701100006B
designator J?  (value not drawn)
WR-TBL Series 7011B Vertical PCB Header, THR, pitch 3.5mm, 06p; Manufacturer: Wurth Elektronik; Insulator Material: LCP; Rated Current (cULus): 10A; Rated Current (VDE): 8A; Working Voltage (cULus): 300V (AC); Working Voltage (VDE): 250V (AC); Withstanding Voltage (cULus): 1600V (AC); Withstanding Voltage (VDE): 1400V (AC); Manufacturer Part Number: 691701100006B; Product Series: WR-TBL; ComponentLink1Description: Website Link; ComponentLink1URL: https://www.we-online.com; ComponentLink2Description: Datasheet Link; ComponentLink2URL: https://www.we-online.com/components/products/datasheet/691701100006B; Mount: Through Hole Reflow; Operating Temperature Min: -40degC; Operating Temperature Max: 130degC; Packaging: Tape and Reel; Application: Pluggable; Number of Pins: 6; Number of Rows: 1; Orientation: Vertical; Lead Pitch: 3.5mm
footprint 691701100006B
pins: 1, 2, 3, 4, 5, 6

## 691701100008B
designator J?  (value not drawn)
WR-TBL Series 7011B Vertical PCB Header, THR, pitch 3.5mm, 08p; Manufacturer: Wurth Elektronik; Insulator Material: LCP; Rated Current (cULus): 10A; Rated Current (VDE): 8A; Working Voltage (cULus): 300V (AC); Working Voltage (VDE): 250V (AC); Withstanding Voltage (cULus): 1600V (AC); Withstanding Voltage (VDE): 1400V (AC); Manufacturer Part Number: 691701100008B; Product Series: WR-TBL; ComponentLink1Description: Website Link; ComponentLink1URL: https://www.we-online.com; ComponentLink2Description: Datasheet Link; ComponentLink2URL: https://www.we-online.com/components/products/datasheet/691701100008B; Mount: Through Hole Reflow; Operating Temperature Min: -40degC; Operating Temperature Max: 130degC; Packaging: Tape and Reel; Application: Pluggable; Number of Pins: 8; Number of Rows: 1; Orientation: Vertical; Lead Pitch: 3.5mm
footprint 691701100008B
pins: 1, 2, 3, 4, 5, 6, 7, 8

## 691701100010B
designator J?  (value not drawn)
WR-TBL Series 7011B Vertical PCB Header, THR, pitch 3.5mm, 10p; Manufacturer: Wurth Elektronik; Insulator Material: LCP; Rated Current (cULus): 10A; Rated Current (VDE): 8A; Working Voltage (cULus): 300V (AC); Working Voltage (VDE): 250V (AC); Withstanding Voltage (cULus): 1600V (AC); Withstanding Voltage (VDE): 1400V (AC); Manufacturer Part Number: 691701100010B; Product Series: WR-TBL; ComponentLink1Description: Website Link; ComponentLink1URL: https://www.we-online.com; ComponentLink2Description: Datasheet Link; ComponentLink2URL: https://www.we-online.com/components/products/datasheet/691701100010B; Mount: Through Hole Reflow; Operating Temperature Min: -40degC; Operating Temperature Max: 130degC; Packaging: Tape and Reel; Application: Pluggable; Number of Pins: 10; Number of Rows: 1; Orientation: Vertical; Lead Pitch: 3.5mm
footprint 691701100010B
pins: 1, 2, 3, 4, 5, 6, 7, 8, 9, 10

## 691701100012B
designator J?  (value not drawn)
WR-TBL Series 7011B Vertical PCB Header, THR, pitch 3.5mm, 12p; Manufacturer: Wurth Elektronik; Insulator Material: LCP; Rated Current (cULus): 10A; Rated Current (VDE): 8A; Working Voltage (cULus): 300V (AC); Working Voltage (VDE): 250V (AC); Withstanding Voltage (cULus): 1600V (AC); Withstanding Voltage (VDE): 1400V (AC); Manufacturer Part Number: 691701100012B; Product Series: WR-TBL; ComponentLink1Description: Website Link; ComponentLink1URL: https://www.we-online.com; ComponentLink2Description: Datasheet Link; ComponentLink2URL: https://www.we-online.com/components/products/datasheet/691701100012B; Mount: Through Hole Reflow; Operating Temperature Min: -40degC; Operating Temperature Max: 130degC; Packaging: Tape and Reel; Application: Pluggable; Number of Pins: 12; Number of Rows: 1; Orientation: Vertical; Lead Pitch: 3.5mm
footprint 691701100012B
pins: 1, 2, 3, 4, 5, 6, 7, 8, 9, 10, 11, 12

## 691701110002B
designator J?  (value not drawn)
WR-TBL Series 7011B Horizontal PCB Header, THR, pitch 3.5mm, 02p; Manufacturer: Wurth Elektronik; Insulator Material: LCP; Rated Current (cULus): 10A; Rated Current (VDE): 8A; Working Voltage (cULus): 300V (AC); Working Voltage (VDE): 250V (AC); Withstanding Voltage (cULus): 1600V (AC); Withstanding Voltage (VDE): 1400V (AC); Manufacturer Part Number: 691701110002B; Product Series: WR-TBL; ComponentLink1Description: Website Link; ComponentLink1URL: https://www.we-online.com; ComponentLink2Description: Datasheet Link; ComponentLink2URL: https://www.we-online.com/components/products/datasheet/691701110002B; Mount: Through Hole Reflow; Operating Temperature Min: -40degC; Operating Temperature Max: 130degC; Packaging: Tape and Reel; Application: Pluggable; Number of Pins: 2; Number of Rows: 1; Orientation: Horizontal; Lead Pitch: 3.5mm
footprint 691701110002B
pins: 1, 2

## 691701110003B
designator J?  (value not drawn)
WR-TBL Series 7011B Horizontal PCB Header, THR, pitch 3.5mm, 03p; Manufacturer: Wurth Elektronik; Insulator Material: LCP; Rated Current (cULus): 10A; Rated Current (VDE): 8A; Working Voltage (cULus): 300V (AC); Working Voltage (VDE): 250V (AC); Withstanding Voltage (cULus): 1600V (AC); Withstanding Voltage (VDE): 1400V (AC); Manufacturer Part Number: 691701110003B; Product Series: WR-TBL; ComponentLink1Description: Website Link; ComponentLink1URL: https://www.we-online.com; ComponentLink2Description: Datasheet Link; ComponentLink2URL: https://www.we-online.com/components/products/datasheet/691701110003B; Mount: Through Hole Reflow; Operating Temperature Min: -40degC; Operating Temperature Max: 130degC; Packaging: Tape and Reel; Application: Pluggable; Number of Pins: 3; Number of Rows: 1; Orientation: Horizontal; Lead Pitch: 3.5mm
footprint 691701110003B
pins: 1, 2, 3

## 691701110004B
designator J?  (value not drawn)
WR-TBL Series 7011B Horizontal PCB Header, THR, pitch 3.5mm, 04p; Manufacturer: Wurth Elektronik; Insulator Material: LCP; Rated Current (cULus): 10A; Rated Current (VDE): 8A; Working Voltage (cULus): 300V (AC); Working Voltage (VDE): 250V (AC); Withstanding Voltage (cULus): 1600V (AC); Withstanding Voltage (VDE): 1400V (AC); Manufacturer Part Number: 691701110004B; Product Series: WR-TBL; ComponentLink1Description: Website Link; ComponentLink1URL: https://www.we-online.com; ComponentLink2Description: Datasheet Link; ComponentLink2URL: https://www.we-online.com/components/products/datasheet/691701110004B; Mount: Through Hole Reflow; Operating Temperature Min: -40degC; Operating Temperature Max: 130degC; Packaging: Tape and Reel; Application: Pluggable; Number of Pins: 4; Number of Rows: 1; Orientation: Horizontal; Lead Pitch: 3.5mm
footprint 691701110004B
pins: 1, 2, 3, 4

## 691701110005B
designator J?  (value not drawn)
WR-TBL Series 7011B Horizontal PCB Header, THR, pitch 3.5mm, 05p; Manufacturer: Wurth Elektronik; Insulator Material: LCP; Rated Current (cULus): 10A; Rated Current (VDE): 8A; Working Voltage (cULus): 300V (AC); Working Voltage (VDE): 250V (AC); Withstanding Voltage (cULus): 1600V (AC); Withstanding Voltage (VDE): 1400V (AC); Manufacturer Part Number: 691701110005B; Product Series: WR-TBL; ComponentLink1Description: Website Link; ComponentLink1URL: https://www.we-online.com; ComponentLink2Description: Datasheet Link; ComponentLink2URL: https://www.we-online.com/components/products/datasheet/691701110005B; Mount: Through Hole Reflow; Operating Temperature Min: -40degC; Operating Temperature Max: 130degC; Packaging: Tape and Reel; Application: Pluggable; Number of Pins: 5; Number of Rows: 1; Orientation: Horizontal; Lead Pitch: 3.5mm
footprint 691701110005B
pins: 1, 2, 3, 4, 5

## 691701110006B
designator J?  (value not drawn)
WR-TBL Series 7011B Horizontal PCB Header, THR, pitch 3.5mm, 06p; Manufacturer: Wurth Elektronik; Insulator Material: LCP; Rated Current (cULus): 10A; Rated Current (VDE): 8A; Working Voltage (cULus): 300V (AC); Working Voltage (VDE): 250V (AC); Withstanding Voltage (cULus): 1600V (AC); Withstanding Voltage (VDE): 1400V (AC); Manufacturer Part Number: 691701110006B; Product Series: WR-TBL; ComponentLink1Description: Website Link; ComponentLink1URL: https://www.we-online.com; ComponentLink2Description: Datasheet Link; ComponentLink2URL: https://www.we-online.com/components/products/datasheet/691701110006B; Mount: Through Hole Reflow; Operating Temperature Min: -40degC; Operating Temperature Max: 130degC; Packaging: Tape and Reel; Application: Pluggable; Number of Pins: 6; Number of Rows: 1; Orientation: Horizontal; Lead Pitch: 3.5mm
footprint 691701110006B
pins: 1, 2, 3, 4, 5, 6

## 691701110008B
designator J?  (value not drawn)
WR-TBL Series 7011B Horizontal PCB Header, THR, pitch 3.5mm, 08p; Manufacturer: Wurth Elektronik; Insulator Material: LCP; Rated Current (cULus): 10A; Rated Current (VDE): 8A; Working Voltage (cULus): 300V (AC); Working Voltage (VDE): 250V (AC); Withstanding Voltage (cULus): 1600V (AC); Withstanding Voltage (VDE): 1400V (AC); Manufacturer Part Number: 691701110008B; Product Series: WR-TBL; ComponentLink1Description: Website Link; ComponentLink1URL: https://www.we-online.com; ComponentLink2Description: Datasheet Link; ComponentLink2URL: https://www.we-online.com/components/products/datasheet/691701110008B; Mount: Through Hole Reflow; Operating Temperature Min: -40degC; Operating Temperature Max: 130degC; Packaging: Tape and Reel; Application: Pluggable; Number of Pins: 8; Number of Rows: 1; Orientation: Horizontal; Lead Pitch: 3.5mm
footprint 691701110008B
pins: 1, 2, 3, 4, 5, 6, 7, 8

## 691701110010B
designator J?  (value not drawn)
WR-TBL Series 7011B Horizontal PCB Header, THR, pitch 3.5mm, 10p; Manufacturer: Wurth Elektronik; Insulator Material: LCP; Rated Current (cULus): 10A; Rated Current (VDE): 8A; Working Voltage (cULus): 300V (AC); Working Voltage (VDE): 250V (AC); Withstanding Voltage (cULus): 1600V (AC); Withstanding Voltage (VDE): 1400V (AC); Manufacturer Part Number: 691701110010B; Product Series: WR-TBL; ComponentLink1Description: Website Link; ComponentLink1URL: https://www.we-online.com; ComponentLink2Description: Datasheet Link; ComponentLink2URL: https://www.we-online.com/components/products/datasheet/691701110010B; Mount: Through Hole Reflow; Operating Temperature Min: -40degC; Operating Temperature Max: 130degC; Packaging: Tape and Reel; Application: Pluggable; Number of Pins: 10; Number of Rows: 1; Orientation: Horizontal; Lead Pitch: 3.5mm
footprint 691701110010B
pins: 1, 2, 3, 4, 5, 6, 7, 8, 9, 10

## 691701110012B
designator J?  (value not drawn)
WR-TBL Series 7011B Horizontal PCB Header, THR, pitch 3.5mm, 12p; Manufacturer: Wurth Elektronik; Insulator Material: LCP; Rated Current (cULus): 10A; Rated Current (VDE): 8A; Working Voltage (cULus): 300V (AC); Working Voltage (VDE): 250V (AC); Withstanding Voltage (cULus): 1600V (AC); Withstanding Voltage (VDE): 1400V (AC); Manufacturer Part Number: 691701110012B; Product Series: WR-TBL; ComponentLink1Description: Website Link; ComponentLink1URL: https://www.we-online.com; ComponentLink2Description: Datasheet Link; ComponentLink2URL: https://www.we-online.com/components/products/datasheet/691701110012B; Mount: Through Hole Reflow; Operating Temperature Min: -40degC; Operating Temperature Max: 130degC; Packaging: Tape and Reel; Application: Pluggable; Number of Pins: 12; Number of Rows: 1; Orientation: Horizontal; Lead Pitch: 3.5mm
footprint 691701110012B
pins: 1, 2, 3, 4, 5, 6, 7, 8, 9, 10, 11, 12